# Altium footprint library laboE_altium.PcbLib: 676 footprints (part 36 of 43)
Each footprint in its own frame and in the unit in brackets; x right, y up, seen from the top. Pads: shape width x height; smd on the part's side, far side on the other; paste and mask are expansions set on the pad; w line width, h text height; cw(c..) or ccw(c..) is an arc to the next point about the centre after c.
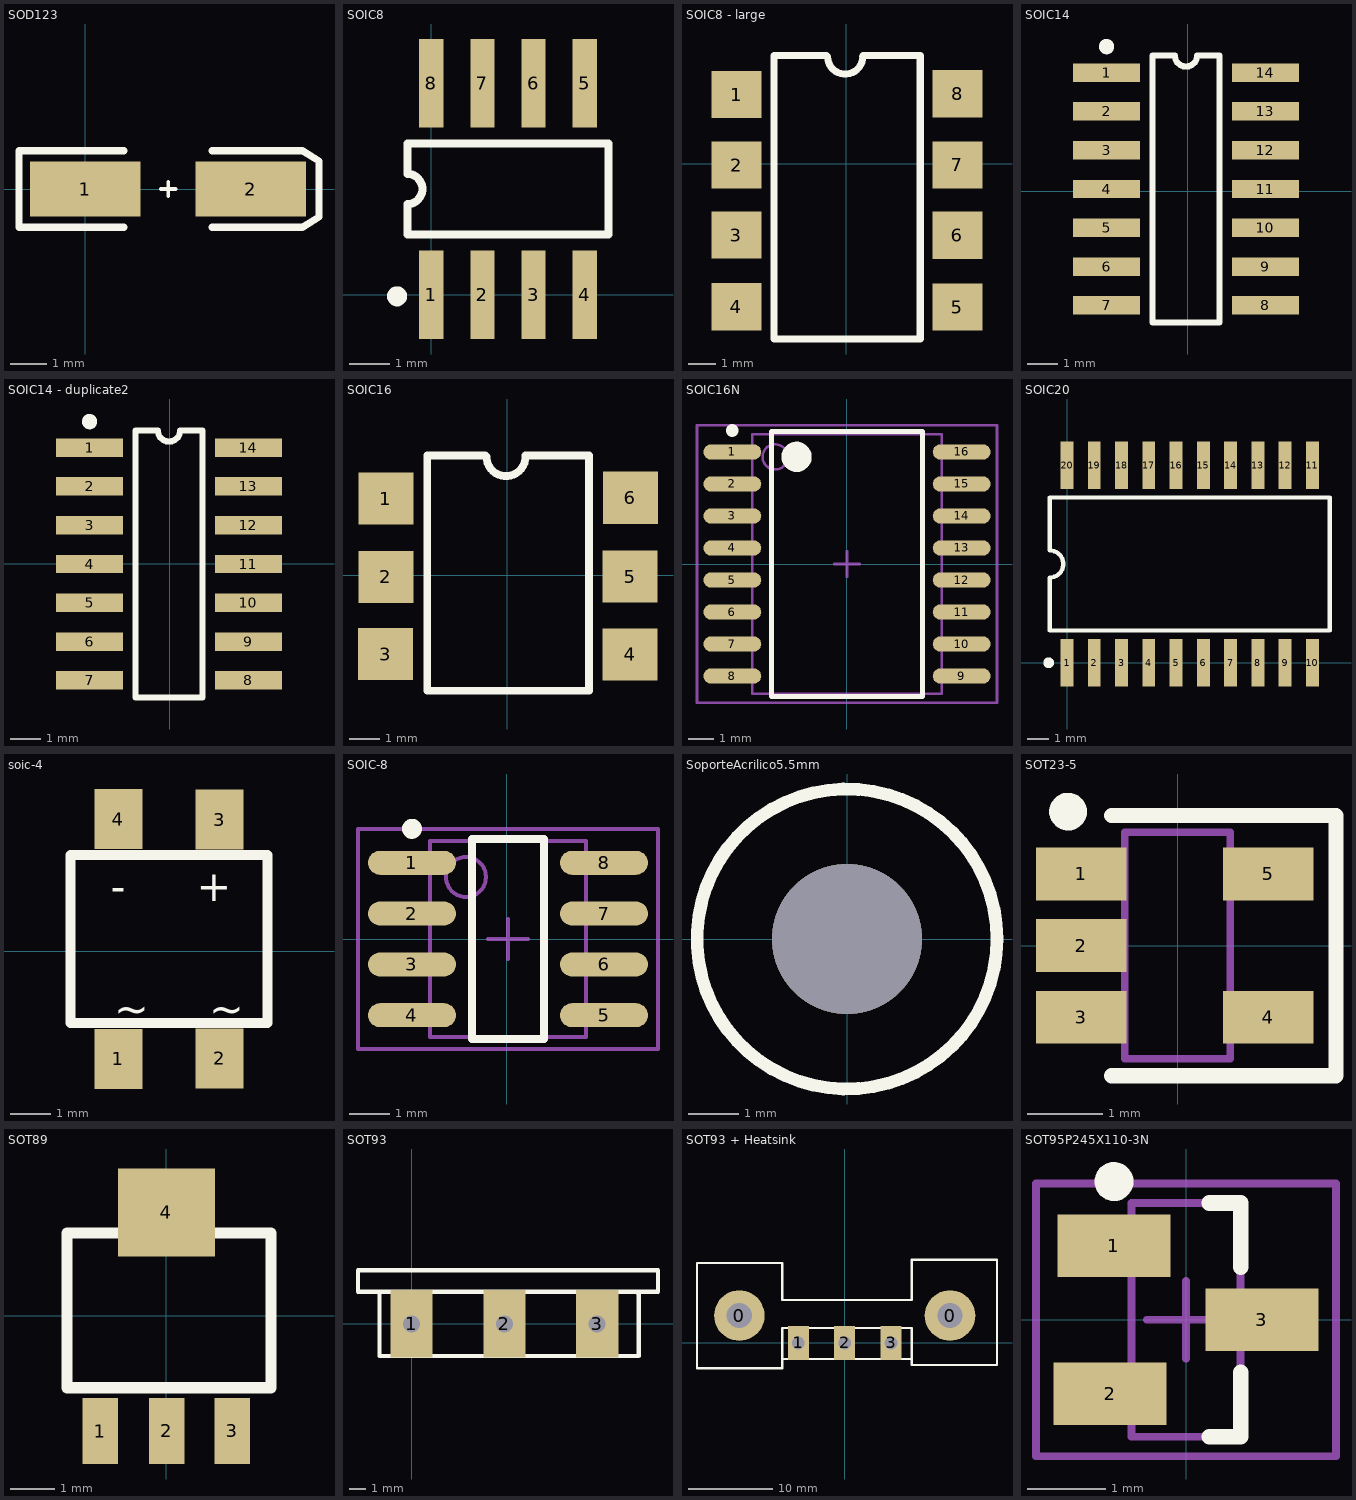
[diagram p35: the footprints below, top view; thin cyan lines are the x and y axes]

## SOD123 [mm]
pads (2):
  rect 3x1.5 smd: 1(0,0) 2(4.5,0)
Top Overlay:
  lines w0.1: 2.05,0 2.45,0 ; 2.25,-0.2 2.25,0.2
  lines w0.2: 1.05,-1.042 -1.804,-1.042 -1.804,1.042 1.05,1.042 ; 3.45,-1.042 5.9,-1.042 6.35,-0.762 6.35,0.762 5.9,1.042 3.45,1.042

## SOIC8 [mm] "SMD"
pads (8):
  rect 0.6x2.2 smd: 1(0,0) 2(1.27,0) 3(2.54,0) 4(3.81,0) 5(3.81,5.25) 6(2.54,5.25) 7(1.27,5.25) 8(0,5.25)
Top Overlay:
  circle w0.25: c-0.85,-0.04 r0.125
  lines w0.2: -0.595,1.5 4.405,1.5 4.405,3.75 -0.595,3.75 -0.595,3 cw(c-0.595,2.625) -0.595,2.25 -0.595,1.5

## SOIC8 - large [mm]
pads (8):
  rect 1.8x1.7 smd: 1(-3.96,2.5) 2(-3.96,-0.05) 3(-3.97,-2.57) 4(-3.97,-5.161) 5(4.01,-5.171) 6(4.01,-2.58) 7(4.01,-0.04) 8(4.02,2.53)
Top Overlay:
  lines w0.254: -0.72,3.91 -2.61,3.91 -2.61,-6.325 2.67,-6.325 2.67,3.91 1.61,3.91 0.6,3.91 ; -0.676,3.871 ccw(c-0.041,3.871) 0.594,3.871
3D body: height 3, standoff 0, extent -2.737,-6.426 2.797,4.037

## SOIC14 [mm]
pads (14):
  rect 2.2x0.6 smd: 1(-2.654,3.883) 2(-2.654,2.613) 3(-2.654,1.343) 4(-2.654,0.073) 5(-2.654,-1.197) 6(-2.654,-2.467) 7(-2.654,-3.737) 8(2.546,-3.737) 9(2.546,-2.467) 10(2.546,-1.197) 11(2.546,0.073) 12(2.546,1.343) 13(2.546,2.613) 14(2.546,3.883)
Top Overlay:
  circle w0.25: c-2.654,4.733 r0.125
  lines w0.2: -1.154,-4.302 1.046,-4.302 1.046,4.448 0.313,4.448 cw(c-0.054,4.448) -0.421,4.448 -1.154,4.448 -1.154,-4.302
3D body: height 1.75, standoff 0, extent -2.14,-4.33 1.85,4.52

## SOIC14 - duplicate2 [mm]
pads (14):
  rect 2.2x0.6 smd: 1(-2.624,3.809) 2(-2.624,2.539) 3(-2.624,1.269) 4(-2.624,-0.001) 5(-2.624,-1.271) 6(-2.624,-2.541) 7(-2.624,-3.811) 8(2.576,-3.811) 9(2.576,-2.541) 10(2.576,-1.271) 11(2.576,-0.001) 12(2.576,1.269) 13(2.576,2.539) 14(2.576,3.809)
Top Overlay:
  circle w0.25: c-2.624,4.659 r0.125
  lines w0.2: -1.124,-4.376 1.076,-4.376 1.076,4.374 0.343,4.374 cw(c-0.024,4.374) -0.39,4.374 -1.124,4.374 -1.124,-4.376
3D body: height 1.75, standoff 0, extent -2.11,-4.404 1.88,4.446

## SOIC16 [mm]
pads (6):
  rect 1.8x1.7 smd: 1(-3.96,2.5) 2(-3.96,-0.05) 3(-3.97,-2.57) 4(4.01,-2.58) 5(4.01,-0.04) 6(4.02,2.53)
Top Overlay:
  lines w0.254: -0.72,3.91 -2.61,3.91 -2.61,-3.77 2.67,-3.77 2.67,3.91 1.61,3.91 0.6,3.91 ; -0.676,3.871 ccw(c-0.041,3.871) 0.594,3.871
3D body: height 3, standoff 0, extent -2.737,-3.897 2.797,4.037

## SOIC16N [mm]
pads (16):
  oval 2.3x0.6 smd: 1(-4.55,4.445) 2(-4.55,3.175) 3(-4.55,1.905) 4(-4.55,0.635) 5(-4.55,-0.635) 6(-4.55,-1.905) 7(-4.55,-3.175) 8(-4.55,-4.445) 9(4.55,-4.445) 10(4.55,-3.175) 11(4.55,-1.905) 12(4.55,-0.635) 13(4.55,0.635) 14(4.55,1.905) 15(4.55,3.175) 16(4.55,4.445)
Top Overlay:
  circle w0.25: c-4.55,5.295 r0.125
  circle w0.6: c-2,4.25 r0.3
  lines w0.2: -3,-5.25 -3,5.25 3,5.25 3,-5.25 -3,-5.25
Mechanical 13:
  circle w0.1: c-2.85,4.25 r0.5
  lines w0.1: -3.75,-5.15 -3.75,5.15 3.75,5.15 3.75,-5.15 -3.75,-5.15
Mechanical 15:
  lines w0.1: -0.5,0 0.5,0 ; 0,-0.5 0,0.5 ; -5.95,-5.5 -5.95,5.5 5.95,5.5 5.95,-5.5 -5.95,-5.5
3D body: height 2.65, standoff 0, extent -3.75,-5.15 3.75,5.15

## SOIC20 [mm]
pads (20):
  rect 0.6x2.2 smd: 1(0,0) 2(1.27,0) 3(2.54,0) 4(3.81,0) 5(5.08,0) 6(6.35,0) 7(7.62,0) 8(8.89,0) 9(10.16,0) 10(11.43,0) 11(11.43,9.2) 12(10.16,9.2) 13(8.89,9.2) 14(7.62,9.2) 15(6.35,9.2) 16(5.08,9.2) 17(3.81,9.2) 18(2.54,9.2) 19(1.27,9.2) 20(0,9.2)
Top Overlay:
  circle w0.25: c-0.85,0 r0.125
  lines w0.2: -0.81,1.5 12.24,1.5 12.24,7.7 -0.81,7.7 -0.81,5.235 cw(c-0.81,4.6) -0.81,3.965 -0.81,1.5

## soic-4 [mm]
pads (4):
  rect 1.2x1.5 smd: 1(-7.41,-2.68) 2(-4.89,-2.67) 3(-4.89,3.28) 4(-7.41,3.29)
Top Overlay:
  lines w0.254: -8.6,-0.424 -8.6,0.084 ; -8.6,-1.79 -3.7,-1.79 -3.7,2.4 -8.6,2.4 -8.6,-1.79
  text "~" at -5.15,-1.79 h0.75
  text "~" at -7.51,-1.79 h0.75
  text "-" at -7.6,1.25 h0.75
  text "+" at -5.46,1.25 h0.75
3D body: height 1, standoff 0, extent -8.599,-1.789 -3.701,2.399

## SOIC-8 [mm]
pads (8):
  oval 2.2x0.6 smd: 1(-2.375,1.905) 2(-2.375,0.635) 3(-2.375,-0.635) 4(-2.375,-1.905) 5(2.425,-1.905) 6(2.425,-0.635) 7(2.425,0.635) 8(2.425,1.905)
Top Overlay:
  circle w0.25: c-2.375,2.755 r0.125
  lines w0.2: -0.875,-2.5 0.925,-2.5 0.925,2.5 -0.875,2.5 -0.875,-2.5
Mechanical 13:
  circle w0.1: c-1.025,1.55 r0.5
  lines w0.1: -1.925,-2.45 1.975,-2.45 1.975,2.45 -1.925,2.45 -1.925,-2.45
Mechanical 15:
  lines w0.1: -0.475,0 0.525,0 ; 0.025,-0.5 0.025,0.5 ; -3.725,-2.75 3.775,-2.75 3.775,2.75 -3.725,2.75 -3.725,-2.75
3D body: height 1.75, standoff 0, extent -1.925,-2.45 1.975,2.45

## SoporteAcrilico5.5mm [mm]
via 0,0 diameter 3 hole 3
Top Overlay:
  circle w0.254: c0,0 r3

## SOT23-5 [mm]
height 1.1
pads (5):
  rect 1.2x0.7 smd: 1(-1.275,0.95) 2(-1.275,0) 3(-1.275,-0.95) 4(1.2,-0.95) 5(1.2,0.95)
Top Overlay:
  circle w0.25: c-1.45,1.775 r0.125
  lines w0.2: -0.875,-1.725 2.1,-1.725 2.1,-0.425 2.1,1.725 -0.875,1.725
Mechanical 13:
  lines w0.1: -0.7,-1.5 -0.7,1.5 0.7,1.5 0.7,-1.5 -0.7,-1.5
3D body: height 1.1, standoff 0.05, extent -0.7,-1.5 0.7,1.5

## SOT89 [mm]
pads (4):
  rect 0.8x1.5 smd: 1(-1.499,-2.623) 2(0.01,-2.62) 3(1.499,-2.619)
  rect 2.2x2 smd: 4(0.005,2.348)
Top Overlay:
  lines w0.254: -2.256,-1.641 -2.256,1.876 2.381,1.876 2.381,-1.641 -2.256,-1.641
3D body: height 2, standoff 0, extent -2.24,-1.695 2.318,1.941

## SOT93 [mm]
height 50
pads (3):
  rect 2.5x4 hole 1: 1(0,0) 2(5.5,0) 3(11,0)
Top Overlay:
  lines w0.254: -1.905,1.905 13.335,1.905 ; -1.905,1.905 -1.905,-1.905 13.462,-1.905 13.462,1.778 13.335,1.905 ; -1.905,1.905 -3.175,1.905 -3.175,3.175 14.605,3.175 14.605,1.905 13.335,1.905

## SOT93 + Heatsink [mm]
height 50
pads (5):
  round 6 hole 3: 0(-12.5,3.25) 0(12.5,3.25)
  rect 2.5x4 hole 1.5: 1(-5.5,0) 2(0,0) 3(5.5,0)
Top Overlay:
  lines w0.254: -7.405,-1.905 7.962,-1.905 ; 7.955,1.778 7.955,-2.622 18.075,-2.622 18.075,1.773 18.075,5.075 18.075,9.878 7.955,9.878 7.955,5.1 ; 7.962,1.778 -7.405,1.778 -7.405,-3 -17.525,-3 -17.525,1.803 -17.525,5.105 -17.525,9.5 -7.405,9.5 -7.405,5.1 7.962,5.1

## SOT95P245X110-3N [mm] "SOT23, 3-Leads, Body 3,0x2,6mm (max), Pitch 0,95mm, IPC Medium Density"
height 1.1
pads (3):
  rect 1.45x0.8 smd: 1(-0.925,0.95) 2(-0.975,-0.95) 3(0.975,0)
Top Overlay:
  circle w0.25: c-0.925,1.775 r0.125
  lines w0.2: 0.3,-1.5 0.7,-1.5 0.7,-0.675 ; 0.3,1.5 0.7,1.5 0.7,0.675
Mechanical 13:
  lines w0.1: -0.7,-1.5 0.7,-1.5 0.7,1.5 -0.7,1.5 -0.7,-1.5
Mechanical 15:
  lines w0.1: -0.5,0 0.5,0 ; 0,-0.5 0,0.5 ; -1.925,-1.75 1.925,-1.75 1.925,1.75 -1.925,1.75 -1.925,-1.75
3D body: height 1.1, standoff 0.05, extent -0.7,-1.5 0.7,1.5